# Altium schematic symbol library Debugging Board.SCHLIB: 1 symbol
Pins are listed as number, name and electrical type; pins without a type are passive.

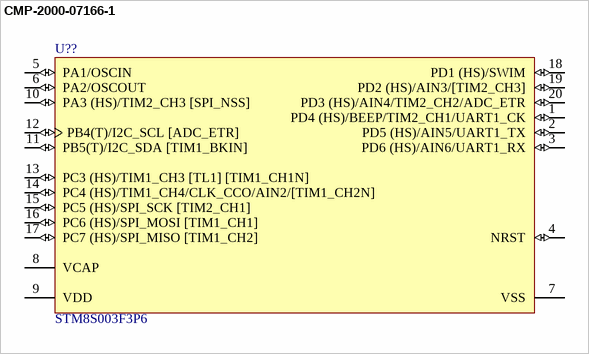
[diagram p0: symbol CMP-2000-07166-1]

## CMP-2000-07166-1
designator U??, comment STM8S003F3P6
Value Line, 16 MHz STM8S 8-Bit MCU, 8 Kbyte Flash, 128 Byte Data EEPROM, 10-Bit ADC, 3 Timers, 2.95 to 5.5 V, -40 to 85 degC, 20-Pin TSSOP, RoHS, Tube; Manufacturer: STMicroelectronics; Connectivity: I²C,IrDA,LIN,SPI,UART/USART; Featured Product: FlasherSeriesofProductionTools; Program Memory Size: 8KB(8Kx8); Oscillator Type: Internal; Other Names: 497-11946-5; Core Processor: STM8; Package Version: Rev. 2, 01/2015; Peripherals: Brown-outDetect/Reset,POR,PWM,WDT; Data Converters: A/D5x10b; Other Related Documents: STM8S003F3ViewAllSpecifications; Number of I/Os: 16; EEPROM Size: 128x8; Speed: 16MHz; RAM Size: 1Kx8; Voltage - Supply (Vcc/Vdd): 2.95V~5.5V; Series: STM8S; Category: IntegratedCircuits(ICs); Program Memory Type: FLASH; Packaging: Tube; Datasheet Version: Rev. 8, 04/2016; Manufacturer URL: http://www.st.com/; Package URL: http://www.st.com/st-web-ui/static/active/en/resource/technical/document/datasheet/DM00141386.pdf; Operating Temperature: -40°C~85°C; Package / Case: 20-TSSOP(0.173",4.40mmWidth); Standard Package: 74; Family: Embedded-Microcontrollers; Datasheet URL: http://www2.st.com/content/ccc/resource/technical/document/datasheet/42/5a/27/87/ac/5a/44/88/DM00024550.pdf/files/DM00024550.pdf/jcr:content/translations/en.DM00024550.pdf; Package Description: 20-Pin Thin Shrink Small Outline Package, Body 6.5 x 4.4 mm, Pitch 0.65 mm; Core Size: 8-Bit; Package Reference: TSSOP20; Mounting Technology: SurfaceMount; Dynamic Catalog: STM8S; Number of I /O: 16
footprint STM-TSSOP20_V (SOP, 20-Leads, Body 6.6x4.5mm, Pitch 0.65mm)
pins: 1 PD4 (HS)/BEEP/TIM2_CH1/UART1_CK (io), 2 PD5 (HS)/AIN5/UART1_TX (io), 3 PD6 (HS)/AIN6/UART1_RX (io), 4 NRST (io) "Reset", 5 PA1/OSCIN (io), 6 PA2/OSCOUT (io), 7 VSS (power) "Digital ground", 8 VCAP (power) "1.8 V regulator  capacitor", 9 VDD (power) "Digital power supply", 10 PA3 (HS)/TIM2_CH3 [SPI_NSS] (io), 11 PB5(T)/I2C_SDA [TIM1_BKIN] (io), 12 PB4(T)/I2C_SCL [ADC_ETR] (io), 13 PC3 (HS)/TIM1_CH3 [TL1] [TIM1_CH1N] (io), 14 PC4 (HS)/TIM1_CH4/CLK_CCO/AIN2/[TIM1_CH2N] (io), 15 PC5 (HS)/SPI_SCK [TIM2_CH1] (io), 16 PC6 (HS)/SPI_MOSI [TIM1_CH1] (io), 17 PC7 (HS)/SPI_MISO [TIM1_CH2] (io), 18 PD1 (HS)/SWIM (io), 19 PD2 (HS)/AIN3/[TIM2_CH3] (io), 20 PD3 (HS)/AIN4/TIM2_CH2/ADC_ETR (io)